# Altium footprint library Miscellaneous$.PcbLib: 44 footprints (part 1 of 3)
Each footprint in its own frame and in the unit in brackets; x right, y up, seen from the top. Pads: shape width x height; smd on the part's side, far side on the other; paste and mask are expansions set on the pad; w line width, h text height; cw(c..) or ccw(c..) is an arc to the next point about the centre after c.
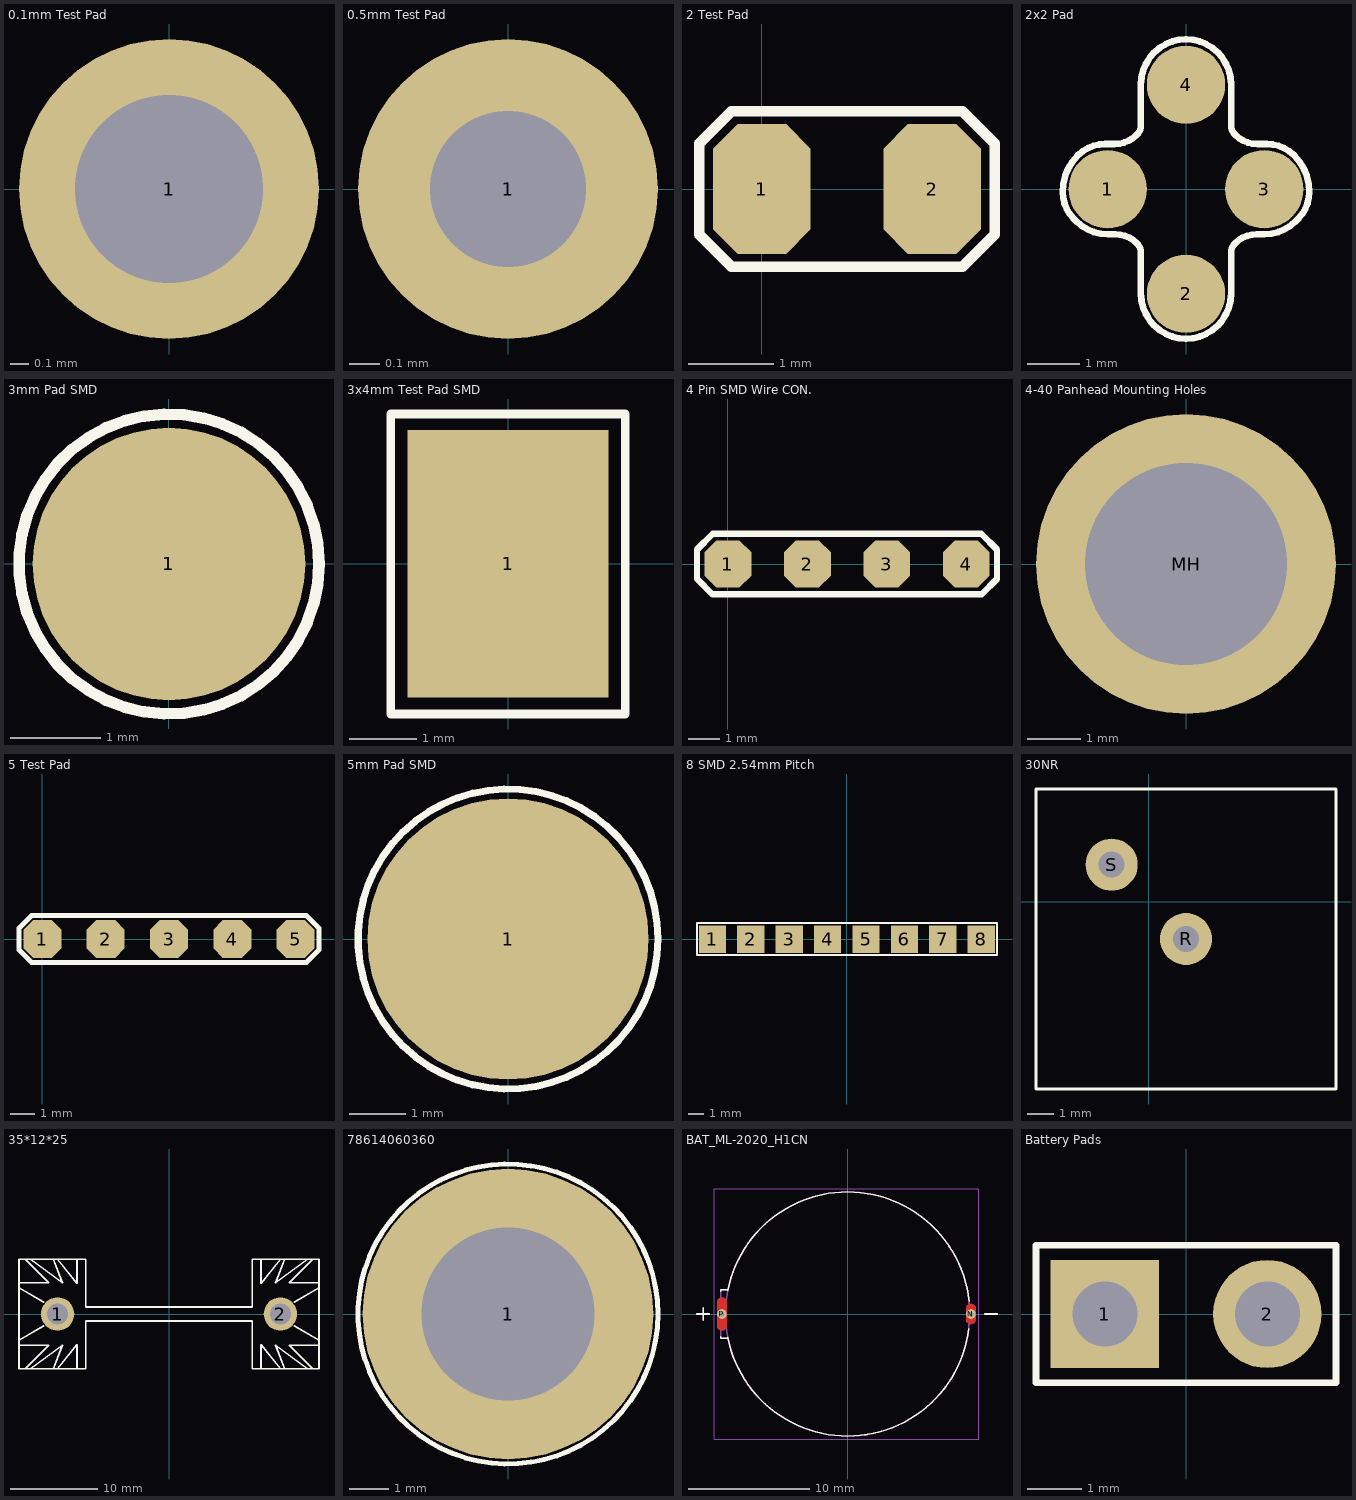
[diagram p0: the footprints below, top view; thin cyan lines are the x and y axes]

## 0.1mm Test Pad [mm]
pads (1):
  round 1.6 hole 1: 1(0,0)

## 0.5mm Test Pad [mm]
pads (1):
  round 1 hole 0.52: 1(0,0)

## 2 Test Pad [mil]
pads (2):
  oct 45x60 smd: 1(0,0) 2(78.74,0)
Top Overlay:
  lines w5: -29,-21 -29,21 -14,36 92.74,36 107.74,21 107.74,-21 92.74,-36 -14,-36 -29,-21

## 2x2 Pad [mm]
pads (4):
  round 1.5 smd paste+0 mask+0.055: 1(-1.5,0) 2(0,-2.007) 3(1.5,0) 4(0,2)
Top Overlay:
  lines w0.127: -0.864,-1.549 -0.864,-1.994 ; -0.864,-1.357 -0.864,-1.22 ccw(c-1.124,-1.22) -0.94,-1.036 ccw(c-1.357,-1.453) -1.357,-0.864 -1.499,-0.864 cw(c-1.499,-0.005) -2.106,-0.612 -2.147,-0.571 cw(c-1.626,-0.051) -2.362,-0.051 cw(c-1.381,-0.051) -2.075,0.643 -2.07,0.648 cw(c-1.549,0.128) -1.549,0.864 -1.369,0.864 ccw(c-1.369,1.471) -0.94,1.041 ccw(c-1.124,1.225) -0.864,1.225 -0.864,1.362 ; -0.864,-1.332 -0.864,-1.994 ; -0.864,1.337 -0.864,1.999 cw(c0.012,1.999) -0.607,2.619 cw(c0,2.012) 0,2.87 cw(c0,2.012) 0.607,2.619 cw(c-0.012,1.999) 0.864,1.999 0.864,1.337 ; 0.864,-1.357 0.864,-1.22 cw(c1.124,-1.22) 0.94,-1.036 cw(c1.357,-1.453) 1.357,-0.864 1.499,-0.864 ccw(c1.499,-0.005) 2.106,-0.612 2.147,-0.571 ccw(c1.626,-0.051) 2.362,-0.051 ccw(c1.381,-0.051) 2.075,0.643 2.07,0.648 ccw(c1.549,0.128) 1.549,0.864 1.369,0.864 cw(c1.369,1.471) 0.94,1.041 cw(c1.124,1.225) 0.864,1.225 0.864,1.362 ; 0.864,-1.332 0.864,-1.994 cw(c-0.012,-1.994) 0.607,-2.614 cw(c0,-2.007) 0,-2.865 cw(c0,-2.007) -0.607,-2.614 cw(c0.012,-1.994) -0.864,-1.994

## 3mm Pad SMD [mm]
pads (1):
  round 3 smd: 1(0,0)
Top Overlay:
  circle w0.127: c0,0 r1.651

## 3x4mm Test Pad SMD [mm]
pads (1):
  rect 3x4 smd: 1(0,0)
Top Overlay:
  lines w0.127: -1.753,-2.245 1.753,-2.245 1.753,2.235 -1.753,2.235 -1.753,-2.245

## 4 Pin SMD Wire CON. [mm]
pads (4):
  oct 1.5x1.5 smd: 1(0,0) 2(2.54,0) 3(5.08,0) 4(7.62,0)
Top Overlay:
  lines w0.2: -0.985,-0.472 -0.985,0.463 -0.483,0.965 -0.38,0.965 8.102,0.965 8.603,0.464 8.603,-0.479 8.117,-0.965 -0.491,-0.965 -0.985,-0.472

## 4-40 Panhead Mounting Holes [mil]
pads (1):
  round 220 hole 148: MH(0,0)

## 5 Test Pad [mil]
pads (5):
  oct 60x60 smd: 1(0,0) 2(100,0) 3(200,0) 4(300,0) 5(400,0)
Top Overlay:
  lines w7.87: -37,-17 -17,-37 417,-37 437,-17 437,17 417,37 -17,37 -37,17 -37,-17

## 5mm Pad SMD [mm]
pads (1):
  round 5 smd: 1(0,0)
Top Overlay:
  circle w0.127: c0,0 r2.667

## 8 SMD 2.54mm Pitch [mm]
pads (8):
  rect 1.8x1.8 smd: 1(-8.89,0) 2(-6.35,0) 3(-3.81,0) 4(-1.27,0) 5(1.27,0) 6(3.81,0) 7(6.35,0) 8(8.89,0)
Top Overlay:
  lines w0.127: -9.906,-1.041 -9.906,1.067 9.931,1.067 9.931,-1.041 -9.906,-1.041

## 30NR [mm]
pads (2):
  round 2 hole 1: R(1.425,-1.425) S(-1.425,1.425)
Top Overlay:
  lines w0.127: -4.325,-7.175 7.175,-7.175 7.175,4.325 -4.325,4.325 -4.325,-7.175
3D body "30nr status indicator.STEP": height 21.1, standoff -19.9, extent -4.325,-7.175 7.175,4.325

## 35*12*25 [mm]
pads (2):
  round 3.8 hole 2.4 paste-2539.97 mask+0.05: 1(-12.7,0) 2(12.7,0)
Top Overlay:
  lines w0.2: -14.295,-1.373 -17.1,-3.01 -17.1,-3.556 ; -14.295,1.373 -17.1,3.01 -17.1,3.556 -13.7,3.556 -16.387,6.25 -15.802,6.25 -12.15,3.556 -13.208,6.25 -12.71,6.25 -10.5,3.5 -10.5,6.25 -9.5,6.25 ; 14.295,-1.373 17.1,-3.01 17.1,-3.556 ; 14.295,1.373 17.1,3.01 17.1,3.556 13.7,3.556 16.387,6.25 15.802,6.25 12.15,3.556 13.208,6.25 12.71,6.25 10.5,3.5 10.5,6.25 ; 17.1,-3.556 13.7,-3.556 16.387,-6.25 15.802,-6.25 12.15,-3.556 13.208,-6.25 12.71,-6.25 10.5,-3.5 10.5,-6.25 ; -17.1,-3.556 -13.7,-3.556 -16.387,-6.25 -15.802,-6.25 -12.15,-3.556 -13.208,-6.25 -12.71,-6.25 -10.5,-3.5 -10.5,-6.25 ; -17.1,-3.556 -17.1,6.25 -9.5,6.25 ; -17.1,-3.556 -17.1,-6.25 -10.5,-6.25 ; -10.5,-6.25 -9.5,-6.25 -9.5,-0.8 9.5,-0.8 9.5,-6.25 10.5,-6.25 ; -9.5,6.25 -9.5,0.8 9.5,0.8 9.5,6.25 10.5,6.25 ; 10.5,-6.25 17.1,-6.25 17.1,-3.556 ; 10.5,6.25 17.1,6.25 17.1,-3.556
3D body "C4663.step": height 25.3, standoff -3.2, extent -17.1,-6.25 17.1,6.25

## 78614060360 [mm]
pads (1):
  round 7.4 hole 4.4: 1(0,0)
Top Overlay:
  circle w0.127: c0,0 r3.821

## BAT_ML-2020_H1CN [mm]
height 3
pads (2):
  round 0.8 hole 0.4 mask+0: N(10.15,0) P(-10.35,0)
Top Layer:
  region: -10.329,1.349 -10.308,1.348 -10.287,1.345 -10.267,1.341 -10.246,1.336 -10.226,1.33 -10.207,1.323 -10.187,1.315 -10.168,1.306 -10.15,1.296 -10.132,1.285 -10.115,1.274 -10.098,1.261 -10.082,1.247 -10.067,1.233 -10.053,1.218 -10.039,1.202 -10.026,1.185 -10.015,1.168 -10.004,1.15 -9.994,1.132 -9.985,1.113 -9.977,1.093 -9.97,1.074 -9.964,1.054 -9.959,1.033 -9.955,1.013 -9.952,0.992 -9.951,0.971 -9.95,0.95 -9.95,0 -9.95,-0.95 -9.951,-0.971 -9.952,-0.992 -9.955,-1.013 -9.959,-1.033 -9.964,-1.054 -9.97,-1.074 -9.977,-1.093 -9.985,-1.113 -9.994,-1.132 -10.004,-1.15 -10.015,-1.168 -10.026,-1.185 -10.039,-1.202 -10.053,-1.218 -10.067,-1.233 -10.082,-1.247 -10.098,-1.261 -10.115,-1.274 -10.132,-1.285 -10.15,-1.296 -10.168,-1.306 -10.187,-1.315 -10.207,-1.323 -10.226,-1.33 -10.246,-1.336 -10.267,-1.341 -10.287,-1.345 -10.308,-1.348 -10.329,-1.349 -10.35,-1.35 -10.371,-1.349 -10.392,-1.348 -10.413,-1.345 -10.433,-1.341 -10.454,-1.336 -10.474,-1.33 -10.493,-1.323 -10.513,-1.315 -10.532,-1.306 -10.55,-1.296 -10.568,-1.285 -10.585,-1.274 -10.602,-1.261 -10.618,-1.247 -10.633,-1.233 -10.647,-1.218 -10.661,-1.202 -10.674,-1.185 -10.685,-1.168 -10.696,-1.15 -10.706,-1.132 -10.715,-1.113 -10.723,-1.093 -10.73,-1.074 -10.736,-1.054 -10.741,-1.033 -10.745,-1.013 -10.748,-0.992 -10.749,-0.971 -10.75,-0.95 -10.75,0 -10.75,0.95 -10.749,0.971 -10.748,0.992 -10.745,1.013 -10.741,1.033 -10.736,1.054 -10.73,1.074 -10.723,1.093 -10.715,1.113 -10.706,1.132 -10.696,1.15 -10.685,1.168 -10.674,1.185 -10.661,1.202 -10.647,1.218 -10.633,1.233 -10.618,1.247 -10.602,1.261 -10.585,1.274 -10.568,1.285 -10.55,1.296 -10.532,1.306 -10.513,1.315 -10.493,1.323 -10.474,1.33 -10.454,1.336 -10.433,1.341 -10.413,1.345 -10.392,1.348 -10.371,1.349 -10.35,1.35
  region: 10.171,0.824 10.192,0.823 10.213,0.82 10.233,0.816 10.254,0.811 10.274,0.805 10.293,0.798 10.313,0.79 10.332,0.781 10.35,0.771 10.368,0.76 10.385,0.749 10.402,0.736 10.418,0.722 10.433,0.708 10.447,0.693 10.461,0.677 10.474,0.66 10.485,0.643 10.496,0.625 10.506,0.607 10.515,0.588 10.523,0.568 10.53,0.549 10.536,0.529 10.541,0.508 10.545,0.488 10.548,0.467 10.549,0.446 10.55,0.425 10.55,0 10.55,-0.425 10.549,-0.446 10.548,-0.467 10.545,-0.488 10.541,-0.508 10.536,-0.529 10.53,-0.549 10.523,-0.568 10.515,-0.588 10.506,-0.607 10.496,-0.625 10.485,-0.643 10.474,-0.66 10.461,-0.677 10.447,-0.693 10.433,-0.708 10.418,-0.722 10.402,-0.736 10.385,-0.749 10.368,-0.76 10.35,-0.771 10.332,-0.781 10.313,-0.79 10.293,-0.798 10.274,-0.805 10.254,-0.811 10.233,-0.816 10.213,-0.82 10.192,-0.823 10.171,-0.824 10.15,-0.825 10.129,-0.824 10.108,-0.823 10.087,-0.82 10.067,-0.816 10.046,-0.811 10.026,-0.805 10.007,-0.798 9.987,-0.79 9.968,-0.781 9.95,-0.771 9.932,-0.76 9.915,-0.749 9.898,-0.736 9.882,-0.722 9.867,-0.708 9.853,-0.693 9.839,-0.677 9.826,-0.66 9.815,-0.643 9.804,-0.625 9.794,-0.607 9.785,-0.588 9.777,-0.568 9.77,-0.549 9.764,-0.529 9.759,-0.508 9.755,-0.488 9.752,-0.467 9.751,-0.446 9.75,-0.425 9.75,0 9.75,0.425 9.751,0.446 9.752,0.467 9.755,0.488 9.759,0.508 9.764,0.529 9.77,0.549 9.777,0.568 9.785,0.588 9.794,0.607 9.804,0.625 9.815,0.643 9.826,0.66 9.839,0.677 9.853,0.693 9.867,0.708 9.882,0.722 9.898,0.736 9.915,0.749 9.932,0.76 9.95,0.771 9.968,0.781 9.987,0.79 10.007,0.798 10.026,0.805 10.046,0.811 10.067,0.816 10.087,0.82 10.108,0.823 10.129,0.824 10.15,0.825
Bottom Layer:
  region: -10.329,1.349 -10.308,1.348 -10.287,1.345 -10.267,1.341 -10.246,1.336 -10.226,1.33 -10.207,1.323 -10.187,1.315 -10.168,1.306 -10.15,1.296 -10.132,1.285 -10.115,1.274 -10.098,1.261 -10.082,1.247 -10.067,1.233 -10.053,1.218 -10.039,1.202 -10.026,1.185 -10.015,1.168 -10.004,1.15 -9.994,1.132 -9.985,1.113 -9.977,1.093 -9.97,1.074 -9.964,1.054 -9.959,1.033 -9.955,1.013 -9.952,0.992 -9.951,0.971 -9.95,0.95 -9.95,0 -9.95,-0.95 -9.951,-0.971 -9.952,-0.992 -9.955,-1.013 -9.959,-1.033 -9.964,-1.054 -9.97,-1.074 -9.977,-1.093 -9.985,-1.113 -9.994,-1.132 -10.004,-1.15 -10.015,-1.168 -10.026,-1.185 -10.039,-1.202 -10.053,-1.218 -10.067,-1.233 -10.082,-1.247 -10.098,-1.261 -10.115,-1.274 -10.132,-1.285 -10.15,-1.296 -10.168,-1.306 -10.187,-1.315 -10.207,-1.323 -10.226,-1.33 -10.246,-1.336 -10.267,-1.341 -10.287,-1.345 -10.308,-1.348 -10.329,-1.349 -10.35,-1.35 -10.371,-1.349 -10.392,-1.348 -10.413,-1.345 -10.433,-1.341 -10.454,-1.336 -10.474,-1.33 -10.493,-1.323 -10.513,-1.315 -10.532,-1.306 -10.55,-1.296 -10.568,-1.285 -10.585,-1.274 -10.602,-1.261 -10.618,-1.247 -10.633,-1.233 -10.647,-1.218 -10.661,-1.202 -10.674,-1.185 -10.685,-1.168 -10.696,-1.15 -10.706,-1.132 -10.715,-1.113 -10.723,-1.093 -10.73,-1.074 -10.736,-1.054 -10.741,-1.033 -10.745,-1.013 -10.748,-0.992 -10.749,-0.971 -10.75,-0.95 -10.75,0 -10.75,0.95 -10.749,0.971 -10.748,0.992 -10.745,1.013 -10.741,1.033 -10.736,1.054 -10.73,1.074 -10.723,1.093 -10.715,1.113 -10.706,1.132 -10.696,1.15 -10.685,1.168 -10.674,1.185 -10.661,1.202 -10.647,1.218 -10.633,1.233 -10.618,1.247 -10.602,1.261 -10.585,1.274 -10.568,1.285 -10.55,1.296 -10.532,1.306 -10.513,1.315 -10.493,1.323 -10.474,1.33 -10.454,1.336 -10.433,1.341 -10.413,1.345 -10.392,1.348 -10.371,1.349 -10.35,1.35
  region: 10.171,0.824 10.192,0.823 10.213,0.82 10.233,0.816 10.254,0.811 10.274,0.805 10.293,0.798 10.313,0.79 10.332,0.781 10.35,0.771 10.368,0.76 10.385,0.749 10.402,0.736 10.418,0.722 10.433,0.708 10.447,0.693 10.461,0.677 10.474,0.66 10.485,0.643 10.496,0.625 10.506,0.607 10.515,0.588 10.523,0.568 10.53,0.549 10.536,0.529 10.541,0.508 10.545,0.488 10.548,0.467 10.549,0.446 10.55,0.425 10.55,0 10.55,-0.425 10.549,-0.446 10.548,-0.467 10.545,-0.488 10.541,-0.508 10.536,-0.529 10.53,-0.549 10.523,-0.568 10.515,-0.588 10.506,-0.607 10.496,-0.625 10.485,-0.643 10.474,-0.66 10.461,-0.677 10.447,-0.693 10.433,-0.708 10.418,-0.722 10.402,-0.736 10.385,-0.749 10.368,-0.76 10.35,-0.771 10.332,-0.781 10.313,-0.79 10.293,-0.798 10.274,-0.805 10.254,-0.811 10.233,-0.816 10.213,-0.82 10.192,-0.823 10.171,-0.824 10.15,-0.825 10.129,-0.824 10.108,-0.823 10.087,-0.82 10.067,-0.816 10.046,-0.811 10.026,-0.805 10.007,-0.798 9.987,-0.79 9.968,-0.781 9.95,-0.771 9.932,-0.76 9.915,-0.749 9.898,-0.736 9.882,-0.722 9.867,-0.708 9.853,-0.693 9.839,-0.677 9.826,-0.66 9.815,-0.643 9.804,-0.625 9.794,-0.607 9.785,-0.588 9.777,-0.568 9.77,-0.549 9.764,-0.529 9.759,-0.508 9.755,-0.488 9.752,-0.467 9.751,-0.446 9.75,-0.425 9.75,0 9.75,0.425 9.751,0.446 9.752,0.467 9.755,0.488 9.759,0.508 9.764,0.529 9.77,0.549 9.777,0.568 9.785,0.588 9.794,0.607 9.804,0.625 9.815,0.643 9.826,0.66 9.839,0.677 9.853,0.693 9.867,0.708 9.882,0.722 9.898,0.736 9.915,0.749 9.932,0.76 9.95,0.771 9.968,0.781 9.987,0.79 10.007,0.798 10.026,0.805 10.046,0.811 10.067,0.816 10.087,0.82 10.108,0.823 10.129,0.824 10.15,0.825
Top Overlay:
  lines w0.127: -12.4,0 -11.4,0 ; -11.9,-0.5 -11.9,0.5 ; -10.45,-1.863 -10.45,-2 -9.9,-2 ; -10.45,1.863 -10.45,2 -9.9,2 ; -9.867,-1.917 ccw(c-0.001,0.001) -0.001,-10.05 ; -9.865,1.918 cw(c0,0) 0,10.05 ; 0,-10.05 ccw(c0,0) 9.976,-1.225 ; 0.006,10.05 cw(c0.006,-0.005) 10.006,1.046 ; 11.3,0 12.3,0
Top Solder:
  drawing of 2 lines, arcs and shapes, not listed
Bottom Solder:
  drawing of 2 lines, arcs and shapes, not listed
Mechanical 1:
  lines w0: -10.55,-0.95 ccw(c-10.35,-0.95) -10.35,-1.15 ccw(c-10.35,-0.95) -10.15,-0.95 -10.15,0.95 ccw(c-10.35,0.95) -10.35,1.15 ccw(c-10.35,0.95) -10.55,0.95 -10.55,-0.95 ; 9.95,-0.425 ccw(c10.15,-0.425) 10.15,-0.625 ccw(c10.15,-0.425) 10.35,-0.425 10.35,0.425 ccw(c10.15,0.425) 10.15,0.625 ccw(c10.15,0.425) 9.95,0.425 9.95,-0.425
Top 3D Body:
  circle w0.127: c0,0 r10.05
  lines w0.127: -12.4,0 -11.4,0 ; -11.9,-0.5 -11.9,0.5 ; -9.9,-2 -10.45,-2 -10.45,2 -9.9,2 ; 11.3,0 12.3,0
Mechanical 15:
  lines w0.05: -11,-10.3 -11,10.3 10.8,10.3 10.8,-10.3 -11,-10.3
3D body "ML-2020_H1CN.stp": height 1.2, standoff -3.5, extent -10.471,-10.076 10.229,9.924

## Battery Pads [mm]
pads (2):
  rect 2x2 hole 1.2: 1(-1.5,0)
  round 2 hole 1.2: 2(1.5,0)
Top Overlay:
  lines w0.127: -2.77,-1.27 2.767,-1.27 2.767,1.27 -2.77,1.27 -2.77,-1.27